# Altium footprint library laboE_altium.PcbLib: 676 footprints (part 18 of 43)
Each footprint in its own frame and in the unit in brackets; x right, y up, seen from the top. Pads: shape width x height; smd on the part's side, far side on the other; paste and mask are expansions set on the pad; w line width, h text height; cw(c..) or ccw(c..) is an arc to the next point about the centre after c.
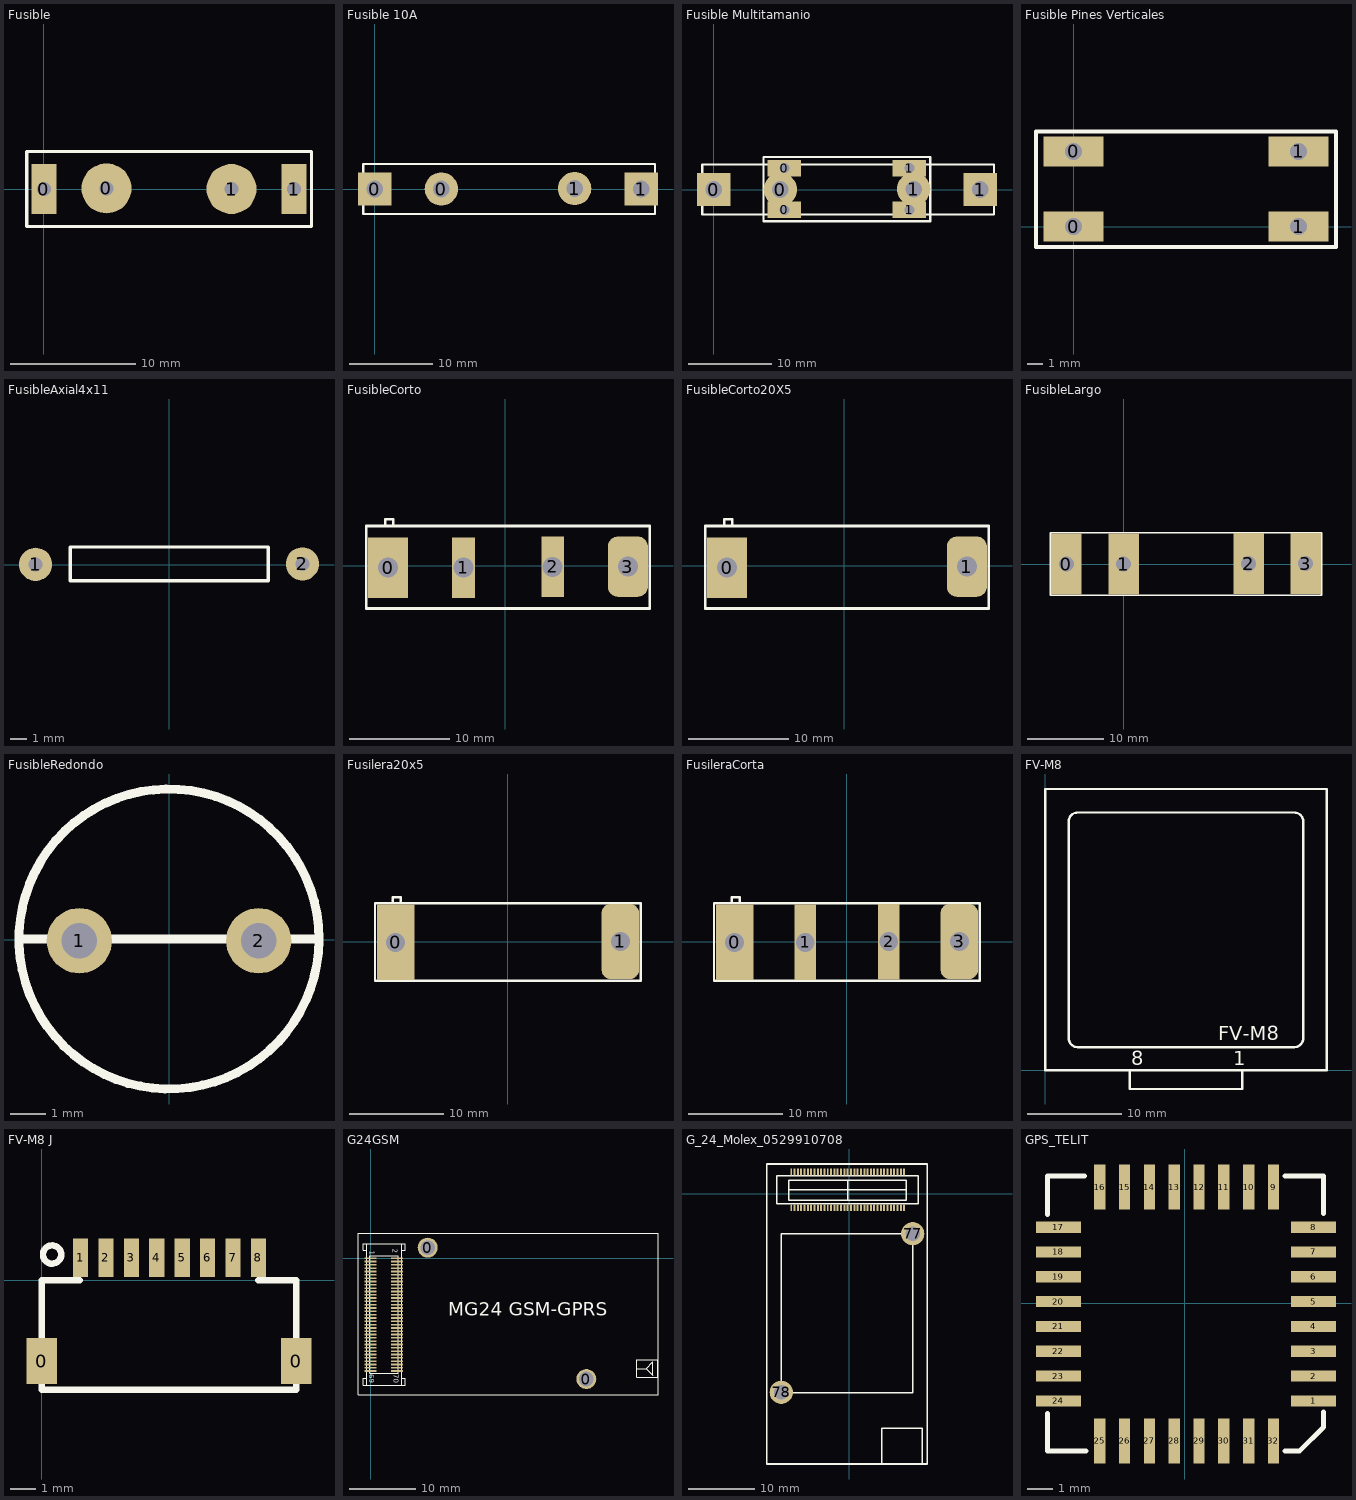
[diagram p17: the footprints below, top view; thin cyan lines are the x and y axes]

## Fusible [mm]
pads (4):
  rect 2x4 hole 1.1: 0(0,0) 1(20,0)
  round 4 hole 1.1: 0(5,0.05) 1(15,0)
Top Overlay:
  lines w0.254: -1.375,-3 -1.375,3 21.4,3 21.4,-3 -1.375,-3
3D body: height 15, standoff 0, extent -1.502,-3.127 21.527,3.127

## Fusible 10A [mm]
pads (4):
  rect 4x4 hole 2: 0(0,0) 1(32,0)
  round 4 hole 2: 0(8,0) 1(24,0.05)
Top Overlay:
  lines w0.254: -1.375,-3 -1.375,3 33.655,3 33.655,-3 -1.375,-3
3D body: height 15, standoff 0, extent -1.502,-3.127 33.655,3.127

## Fusible Multitamanio [mm]
pads (8):
  rect 4x4 hole 2: 0(0,0) 1(32,0)
  round 4 hole 2: 0(8,0) 1(24,0.05)
  rect 4x2 hole 1.2: 0(8.484,-2.438) 0(8.484,2.562) 1(23.484,-2.438) 1(23.484,2.562)
Top Overlay:
  lines w0.254: -1.375,-3 -1.375,3 33.655,3 33.655,-3 -1.375,-3 ; 5.984,-3.813 25.984,-3.813 25.984,3.887 5.984,3.887 5.984,-3.813
3D body: height 15, standoff 0, extent -1.502,-3.127 33.655,3.127
3D body: height 15, standoff 0, extent 5.857,-3.94 26.111,4.014

## Fusible Pines Verticales [mm]
pads (4):
  rect 4x2 hole 1.1: 0(0,0) 0(0,5) 1(15,0) 1(15,5)
Top Overlay:
  lines w0.254: -2.5,-1.375 -2.5,6.325 17.5,6.325 17.5,-1.375 -2.5,-1.375
3D body: height 15, standoff 0, extent -2.627,-1.502 17.627,6.452

## FusibleAxial4x11 [mm]
pads (2):
  round 2 hole 0.85: 1(-8.048,0.014) 2(8.004,0.039)
Top Overlay:
  lines w0.2: -5.966,-0.977 -5.966,1.055 5.947,1.055 5.947,-0.977 -5.966,-0.977
3D body: height 2.4, standoff 0.4, extent -6.002,-0.957 5.998,1.035
3D body: height 1.7, standoff 1.1, extent -7.945,-0.261 8.055,0.336
3D body: height 1.5, standoff 0, extent 7.73,-0.256 8.33,0.344
3D body: height 1.5, standoff 0, extent -8.125,-0.261 -7.525,0.339

## FusibleCorto [mm]
pads (4):
  rect 4x6 hole 2: 0(-11.657,-0.19)
  rect 2.25x6 hole 2: 1(-4.157,-0.19) 2(4.713,-0.11)
  rrect50% 4x6 hole 2: 3(12.203,-0.09)
Top Overlay:
  lines w0.254: -13.847,-4.28 -13.847,3.93 ; -13.847,-4.26 14.383,-4.26 14.383,3.95 -13.847,3.95 ; -11.797,3.95 -11.947,3.95 -11.947,4.62 -11.127,4.62 -11.127,3.95 -11.107,3.95
3D body: height 1, standoff 0, extent -13.758,-4.291 -3.293,4.012
3D body: height 5, standoff 1, extent -13.555,3.1 -3.09,3.989
3D body: height 1, standoff 0, extent 3.869,-4.24 14.335,4.064
3D body: height 5, standoff 1, extent -13.606,-4.203 -3.141,-3.314
3D body: height 5, standoff 1, extent 3.793,3.036 14.258,3.925
3D body: height 5, standoff 1, extent 3.615,-4.19 14.08,-3.301
3D body: height 4, standoff 0, extent -13.64,-1.986 14.36,2.014
3D body: height 4, standoff 0, extent -13.761,-2.037 -10.761,1.962
3D body: height 4, standoff 0, extent 11.49,-1.942 14.49,2.057

## FusibleCorto20X5 [mm]
pads (2):
  rect 4x6 hole 2: 0(-11.657,-0.19)
  rrect50% 4x6 hole 2: 1(12.203,-0.09)
Top Overlay:
  lines w0.254: -13.847,-4.28 -13.847,3.93 ; -13.847,-4.26 14.383,-4.26 14.383,3.95 -13.847,3.95 ; -11.797,3.95 -11.947,3.95 -11.947,4.62 -11.127,4.62 -11.127,3.95 -11.107,3.95
3D body: height 4, standoff 0, extent 11.49,-1.942 14.49,2.057
3D body: height 4, standoff 0, extent -13.761,-2.037 -10.761,1.962
3D body: height 4, standoff 0, extent -13.64,-1.986 14.36,2.014
3D body: height 5, standoff 1, extent 3.615,-4.19 14.08,-3.301
3D body: height 5, standoff 1, extent 3.793,3.036 14.258,3.925
3D body: height 5, standoff 1, extent -13.606,-4.203 -3.141,-3.314
3D body: height 1, standoff 0, extent 3.869,-4.24 14.335,4.064
3D body: height 5, standoff 1, extent -13.555,3.1 -3.09,3.989
3D body: height 1, standoff 0, extent -13.758,-4.291 -3.293,4.012

## FusibleLargo [mm]
pads (4):
  rect 4x8 hole 2: 0(-7.5,0) 1(0,0) 2(16.42,0.06) 3(23.91,0.08)
Top Overlay:
  lines w0.254: -9.6,-4.09 26.03,-4.09 26.03,4.12 -9.6,4.12 -9.6,-4.09
Multi-Layer:
  rectangle: 17.97,-3.47 22.31,3.43
  rectangle: -6.12,-3.47 -1.94,3.43

## FusibleRedondo [mm]
pads (2):
  round 1.85 hole 1: 1(-2.54,-0.025) 2(2.54,-0.025)
Top Overlay:
  lines w0.254: -4.242,0.025 4.25,0.025 ccw(c0,0.025) 4.25,0
3D body: height 8, standoff 0, extent -4.275,-4.274 4.225,4.224

## Fusilera20x5 [mm]
pads (2):
  rect 4x8 hole 2: 0(-11.93,-0.05)
  rrect50% 4x8 hole 2: 1(11.93,0.05)
Top Overlay:
  lines w0.254: -14.12,-4.14 -14.12,4.07 ; -14.12,-4.12 14.11,-4.12 14.11,4.09 -14.12,4.09 ; -12.07,4.09 -12.22,4.09 -12.22,4.76 -11.4,4.76 -11.4,4.09 -11.38,4.09

## FusileraCorta [mm]
pads (4):
  rect 4x8 hole 2: 0(-11.93,-0.05)
  rect 2.25x8 hole 2: 1(-4.43,-0.05) 2(4.44,0.03)
  rrect50% 4x8 hole 2: 3(11.93,0.05)
Top Overlay:
  lines w0.254: -14.12,-4.14 -14.12,4.07 ; -14.12,-4.12 14.11,-4.12 14.11,4.09 -14.12,4.09 ; -12.07,4.09 -12.22,4.09 -12.22,4.76 -11.4,4.76 -11.4,4.09 -11.38,4.09

## FV-M8 [mm] "Modulo GPS&Antena"
Top Overlay:
  lines w0.254: 9,0 21,0 ; 9,0 0,0 0,30 30,30 30,0 21,0 ; 9,0 9,-2 21,-2 21,0 ; 2.484,3.416 ccw(c3.429,3.416) 3.429,2.471 26.555,2.471 ccw(c26.556,3.416) 27.501,3.416 27.501,26.543 ccw(c26.556,26.543) 26.556,27.488 3.429,27.488 ccw(c3.429,26.543) 2.484,26.543 2.484,3.416
  text "8" at 9.144,0.508 h1.52
  text "1" at 20.066,0.508 h1.52
  text "FV-M8" at 18.415,3.175 h1.52

## FV-M8 J [mil] "Modulo GPS&Antena CONECTOR"
pads (10):
  rect 47.24x70.87 smd: 0(0,-125) 0(394.06,-125)
  rect 23.62x60 smd: 1(60,35) 2(99.37,35) 3(138.74,35) 4(178.11,35) 5(217.48,35) 6(256.85,35) 7(296.22,35) 8(335.59,35)
Top Overlay:
  circle w10: c15.86,40 r14.14
  lines w10: 59.06,0 0,0 0,-169.29 394.06,-169.29 394.06,0 335,0

## G24GSM [mm]
pads (72):
  round 3 hole 2.2: 0(8.6,1.6) 0(32.5,-18.2)
  rect 1.8x0.25 smd: 1(0,0) 2(4,0) 3(0,-0.5) 4(4,-0.5) 5(0,-1) 6(4,-1) 7(0,-1.5) 8(4,-1.5) 9(0,-2) 10(4,-2) 11(0,-2.5) 12(4,-2.5) 13(0,-3) 14(4,-3) 15(0,-3.5) 16(4,-3.5) 17(0,-4) 18(4,-4) 19(0,-4.5) 20(4,-4.5) 21(0,-5) 22(4,-5) 23(0,-5.5) 24(4,-5.5) 25(0,-6) 26(4,-6) 27(0,-6.5) 28(4,-6.5) 29(0,-7) 30(4,-7) 31(0,-7.5) 32(4,-7.5) 33(0,-8) 34(4,-8) 35(0,-8.5) 36(4,-8.5) 37(0,-9) 38(4,-9) 39(0,-9.5) 40(4,-9.5) 41(0,-10) 42(4,-10) 43(0,-10.5) 44(4,-10.5) 45(0,-11) 46(4,-11) 47(0,-11.5) 48(4,-11.5) 49(0,-12) 50(4,-12) 51(0,-12.5) 52(4,-12.5) 53(0,-13) 54(4,-13) 55(0,-13.5) 56(4,-13.5) 57(0,-14) 58(4,-14) 59(0,-14.5) 60(4,-14.5) 61(0,-15) 62(4,-15) 63(0,-15.5) 64(4,-15.5) 65(0,-16) 66(4,-16) 67(0,-16.5) 68(4,-16.5) 69(0,-17) 70(4,-17)
Top Overlay:
  lines w0.1: 40.1,-16.637 41.529,-16.637 ; -0.6,-19.1 4.7,-19.1 ; -0.6,-19.1 -1.1,-19.1 -1.1,-18.1 -0.6,-18.1 -0.6,-19.1 ; -0.6,-19.1 -0.6,2.2 ; -0.6,2.2 4.7,2.2 ; -0.6,2.2 -1.1,2.2 -1.1,1.2 -0.6,1.2 -0.6,2.2 ; 4.7,-19.1 5.2,-19.1 5.2,-18.1 4.7,-18.1 4.7,-19.1 ; 4.7,-19.1 4.7,2.2 ; 4.7,2.2 5.2,2.2 5.2,1.2 4.7,1.2 4.7,2.2 ; 41.529,-16.637 42.545,-15.621 42.545,-17.653 41.529,-16.637 ; -1.9,-20.6 43.3,-20.6 43.3,3.8 -1.9,3.8 -1.9,-20.6 ; -0.1,-17.3 4.2,-17.3 4.2,0.4 -0.1,0.4 -0.1,-17.3 ; 40.1,-17.9 43.3,-17.9 43.3,-15.3 40.1,-15.3 40.1,-17.9
  text "2" at 3.3,1.4 h0.76
  text "1" at -0.1,1.1 h0.76
  text "70" at 3.5,-17.5 h0.76
  text "69" at -0.2,-17.5 h0.76
  text "MG24 GSM-GPRS" at 11.684,-8.636 h2.03

## G_24_Molex_0529910708 [mm]
pads (72):
  rect 0.3x1 smd: 1(8.25,3.25) 2(8.25,-2.15) 3(7.75,3.25) 4(7.75,-2.15) 5(7.25,3.25) 6(7.25,-2.15) 7(6.75,3.25) 8(6.75,-2.15) 9(6.25,3.25) 10(6.25,-2.15) 11(5.75,3.25) 12(5.75,-2.15) 13(5.25,3.25) 14(5.25,-2.15) 15(4.75,3.25) 16(4.75,-2.15) 17(4.25,3.25) 18(4.25,-2.15) 19(3.75,3.25) 20(3.75,-2.15) 21(3.25,3.25) 22(3.25,-2.15) 23(2.75,3.25) 24(2.75,-2.15) 25(2.25,3.25) 26(2.25,-2.15) 27(1.75,3.25) 28(1.75,-2.15) 29(1.25,3.25) 30(1.25,-2.15) 31(0.75,3.25) 32(0.75,-2.15) 33(0.25,3.25) 34(0.25,-2.15) 35(-0.25,3.25) 36(-0.25,-2.15) 37(-0.75,3.25) 38(-0.75,-2.15) 39(-1.25,3.25) 40(-1.25,-2.15) 41(-1.75,3.25) 42(-1.75,-2.15) 43(-2.25,3.25) 44(-2.25,-2.15) 45(-2.75,3.25) 46(-2.75,-2.15) 47(-3.25,3.25) 48(-3.25,-2.15) 49(-3.75,3.25) 50(-3.75,-2.15) 51(-4.25,3.25) 52(-4.25,-2.15) 53(-4.75,3.25) 54(-4.75,-2.15) 55(-5.25,3.25) 56(-5.25,-2.15) 57(-5.75,3.25) 58(-5.75,-2.15) 59(-6.25,3.25) 60(-6.25,-2.15) 61(-6.75,3.25) 62(-6.75,-2.15) 63(-7.25,3.25) 64(-7.25,-2.15) 65(-7.75,3.25) 66(-7.75,-2.15) 67(-8.25,3.25) 68(-8.25,-2.15) 69(-8.75,3.25) 70(-8.75,-2.15)
  round 3.5 hole 2.2: 77(9.55,-6.05) 78(-10.25,-29.95)
Top Overlay:
  lines w0.2: -9.1,0.55 8.6,0.55 ; -0.25,-1 -0.25,2 ; -10.9,-1.55 -9.1,-1.55 8.6,-1.55 10.4,-1.55 10.4,2.65 8.6,2.65 -9.1,2.65 -10.9,2.65 -10.9,-1.55 ; -9.1,-1 -9.1,0 -9.1,2 8.6,2 8.6,-1 -9.1,-1
  lines w0.254: 4.9,-40.75 4.9,-35.35 7.95,-35.35 11,-35.35 11,-40.7 ; -12.45,-40.75 -12.45,-6.05 -12.45,4.45 -10.25,4.45 -2.05,4.45 11.75,4.45 11.75,-40.75 -12.45,-40.75 ; -10.25,-29.95 -10.2,-30 9.55,-30 9.55,-6.05 -10.25,-6.05 -10.25,-29.95
3D body: height 3, standoff 1.6, extent -12.577,-40.877 11.877,4.577

## GPS_TELIT [mm]
pads (32):
  rect 1.8x0.45 smd: 1(5.154,-3.907) 2(5.154,-2.914) 3(5.154,-1.921) 4(5.154,-0.928) 5(5.154,0.064) 6(5.154,1.057) 7(5.154,2.05) 8(5.154,3.043) 17(-5.046,3.043) 18(-5.046,2.05) 19(-5.046,1.057) 20(-5.046,0.064) 21(-5.046,-0.928) 22(-5.046,-1.921) 23(-5.046,-2.914) 24(-5.046,-3.907)
  rect 0.45x1.8 smd: 9(3.554,4.643) 10(2.561,4.643) 11(1.568,4.643) 12(0.575,4.643) 13(-0.417,4.643) 14(-1.41,4.643) 15(-2.403,4.643) 16(-3.396,4.643) 25(-3.396,-5.507) 26(-2.403,-5.507) 27(-1.41,-5.507) 28(-0.417,-5.507) 29(0.575,-5.507) 30(1.568,-5.507) 31(2.561,-5.507) 32(3.554,-5.507)
Top Overlay:
  lines w0.2: -5.496,-4.407 -5.496,-5.907 -3.946,-5.907 ; -5.496,3.543 -5.496,5.093 -3.996,5.093 ; 4.004,-5.907 4.604,-5.907 5.554,-4.957 5.554,-4.357 ; 4.004,5.093 5.554,5.093 5.554,3.593
3D body: height 2, standoff 0.2, extent -5.446,-5.907 5.554,5.093
3D body: height 6.1, standoff 1.2, extent -4.096,-4.407 4.154,3.593